# Altium footprint library LDO-DC_DC.PcbLib: 40 footprints (part 3 of 3)
Each footprint in its own frame and in the unit in brackets; x right, y up, seen from the top. Pads: shape width x height; smd on the part's side, far side on the other; paste and mask are expansions set on the pad; w line width, h text height; cw(c..) or ccw(c..) is an arc to the next point about the centre after c.
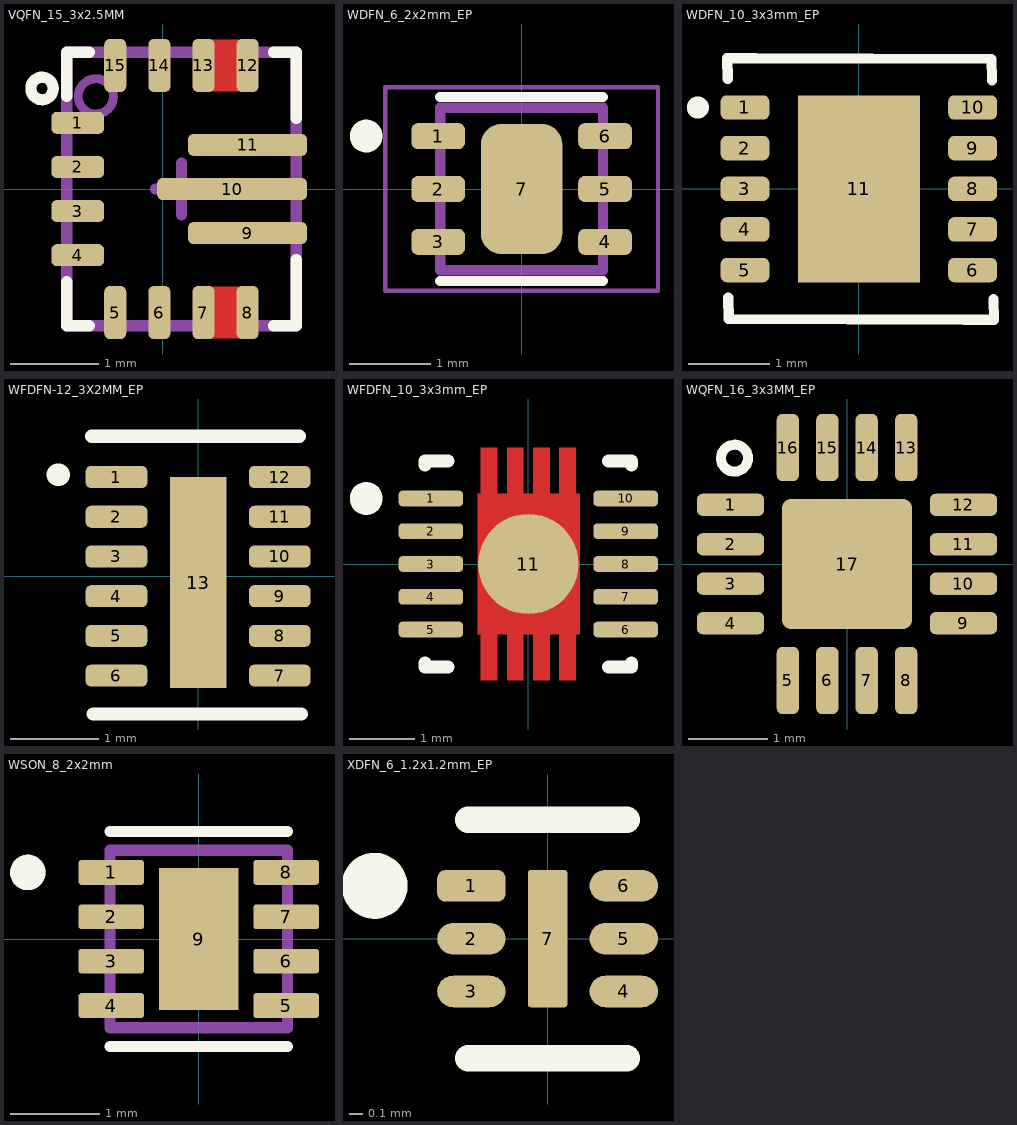
[diagram p2: the footprints below, top view; thin cyan lines are the x and y axes]

## VQFN_15_3x2.5MM [mm] "15-VQFN-HR / 20190221 / H-D.Garcia"
pads (15):
  rrect50% 0.6x0.25 smd: 1(-0.962,0.75) 2(-0.962,0.25) 3(-0.962,-0.25) 4(-0.962,-0.75)
  rrect50% 0.25x0.6 smd: 5(-0.537,-1.4) 6(-0.037,-1.4) 7(0.463,-1.4) 8(0.962,-1.4) 12(0.962,1.4) 13(0.463,1.4) 14(-0.037,1.4) 15(-0.537,1.4)
  rrect50% 1.35x0.25 smd: 9(0.963,-0.5) 11(0.963,0.5)
  rrect50% 1.7x0.25 smd: 10(0.788,0)
Top Layer:
  region: 0.378,1.689 1.028,1.689 1.028,1.109 0.378,1.109
  region: 0.378,-1.111 1.028,-1.111 1.028,-1.691 0.378,-1.691
Top Overlay:
  circle w0.127: c-1.367,1.139 r0.127
  lines w0.127: -1.087,-1.05 -1.087,-1.551 -0.832,-1.551 ; -1.087,1.05 -1.087,1.549 -0.832,1.549 ; 1.258,-1.551 1.513,-1.551 1.513,-0.8 ; 1.258,1.549 1.513,1.549 1.513,0.8
Mechanical 1:
  circle w0.1: c-0.757,1.049 r0.2
  lines w0.127: -1.087,-1.551 -1.087,1.549 1.513,1.549 1.513,-1.551 -1.087,-1.551
Mechanical 15:
  lines w0.127: -0.082,-0.001 0.508,-0.001 ; 0.213,-0.296 0.213,0.294 ; -1.087,-1.551 -1.087,1.549 1.513,1.549 1.513,-1.551 -1.087,-1.551
3D body "IC-TPS63070 VQFN-15.STEP": height 1.05, standoff 0, extent -1.087,-1.551 1.513,1.549

## WDFN_6_2x2mm_EP [mm] "/20210511/C-A.Serna.A"
pads (7):
  rrect50% 0.66x0.32 smd: 1(-1.025,0.65) 2(-1.025,0) 3(-1.025,-0.65) 4(1.025,-0.65) 5(1.025,0) 6(1.025,0.65)
  rrect50% 1x1.6 smd: 7(0,0)
Top Overlay:
  circle w0.203: c-1.91,0.65 r0.1
  lines w0.127: -1,-1.13 1,-1.13 ; -1,1.13 1,1.13
Mechanical 1:
  lines w0.127: -1,-1 1,-1 1,1 -1,1 -1,-1
Mechanical 15:
  lines w0.05: -1.675,-1.25 -1.675,1.25 1.675,1.25 1.675,-1.25 -1.675,-1.25
3D body "step_temp.STEP": height 0.8, standoff 0, extent -1.001,-1.003 0.999,0.997

## WDFN_10_3x3mm_EP [mm] "/ 20220809 / J-E.Pachon"
pads (11):
  rrect50% 0.6x0.3 smd: 1(-1.4,1) 2(-1.4,0.5) 3(-1.4,0) 4(-1.4,-0.5) 5(-1.4,-1) 6(1.4,-1) 7(1.4,-0.5) 8(1.4,0) 9(1.4,0.5) 10(1.4,1)
  rect 1.5x2.3 smd: 11(0,0)
Top Overlay:
  circle w0.25: c-1.98,1 r0.01
  lines w0.127: -1.611,1.35 -1.618,1.604 -1.272,1.604 1.633,1.596 1.638,1.336 ; -1.606,-1.341 -1.601,-1.601 1.304,-1.609 1.664,-1.609 1.657,-1.357
3D body "MLP10_3X3_ONS.step": height 0.81, standoff 0, extent -1.499,-1.499 1.499,1.499

## WFDFN-12_3X2MM_EP [mm] "20211216 / E.Naranjo"
pads (13):
  rrect50% 0.7x0.25 smd: 1(-0.925,1.125) 2(-0.925,0.675) 3(-0.925,0.225) 4(-0.925,-0.225) 5(-0.925,-0.675) 6(-0.925,-1.125) 7(0.925,-1.125) 8(0.925,-0.675) 9(0.925,-0.225) 10(0.925,0.225) 11(0.925,0.675) 12(0.925,1.125)
  rect 0.64x2.39 smd: 13(0,-0.07)
Top Overlay:
  lines w0.152: -1.207,1.586 1.147,1.586 ; -1.187,-1.56 1.167,-1.56
  lines w0.254: -1.59,1.15 ccw(c-1.59,1.495) -1.58,1.15
3D body "DFN-12_DDB_LIT.step": height 0.8, standoff 0, extent -1.041,-1.552 1.059,1.548

## WFDFN_10_3x3mm_EP [mm] "10-WFDFN,10-WSON / 20210511 / C-A.Serna.A"
pads (11):
  rrect50% 0.985x0.239 smd: 1(-1.487,1) 2(-1.487,0.5) 3(-1.487,0) 4(-1.487,-0.5) 5(-1.487,-1) 6(1.487,-1) 7(1.487,-0.5) 8(1.487,0) 9(1.487,0.5) 10(1.487,1)
  round 1.53 smd paste-1000 mask+0: 11(0,0)
Top Layer:
  region: -0.772,1.075 -0.725,1.075 -0.725,1.775 -0.475,1.775 -0.475,1.075 -0.325,1.075 -0.325,1.775 -0.075,1.775 -0.075,1.075 0.075,1.075 0.075,1.775 0.325,1.775 0.325,1.075 0.475,1.075 0.475,1.775 0.725,1.775 0.725,1.075 0.787,1.075 0.787,-1.075 0.725,-1.075 0.725,-1.775 0.475,-1.775 0.475,-1.075 0.325,-1.075 0.325,-1.775 0.075,-1.775 0.075,-1.075 -0.075,-1.075 -0.075,-1.775 -0.325,-1.775 -0.325,-1.075 -0.475,-1.075 -0.475,-1.775 -0.725,-1.775 -0.725,-1.075 -0.772,-1.075
Top Overlay:
  circle w0.25: c-2.475,1 r0.125
  lines w0.2: -1.575,-1.515 -1.575,-1.575 -1.225,-1.575 ; -1.575,1.515 -1.575,1.575 -1.225,1.575 ; 1.225,-1.575 1.575,-1.575 1.575,-1.515 ; 1.225,1.575 1.575,1.575 1.575,1.515
Top Paste:
  rectangle: -0.76,-1.01 -0.11,-0.11
  rectangle: -0.76,0.11 -0.11,1.01
  rectangle: 0.11,0.11 0.76,1.01
  rectangle: 0.485,-1.76 0.715,-1.16
  rectangle: 0.085,-1.76 0.315,-1.16
  rectangle: -0.315,-1.76 -0.085,-1.16
  rectangle: -0.715,-1.76 -0.485,-1.16
  rectangle: 0.485,1.16 0.715,1.76
  rectangle: 0.085,1.16 0.315,1.76
  rectangle: -0.315,1.16 -0.085,1.76
  rectangle: -0.715,1.16 -0.485,1.76
Mechanical 16:
  lines w0.1: -0.5,0 0.5,0 ; 0,-0.5 0,0.5
3D body "IC_Texas_Instruments_TPS63060DSCR_eec.STEP": height 0.8, standoff 0, extent -1.501,-1.501 1.502,1.502

## WQFN_16_3x3MM_EP [mm] "20190516 / V-A.Patino"
pads (17):
  rrect50% 0.85x0.28 smd: 1(-1.475,0.75) 2(-1.475,0.25) 3(-1.475,-0.25) 4(-1.475,-0.75) 9(1.475,-0.75) 10(1.475,-0.25) 11(1.475,0.25) 12(1.475,0.75)
  rrect50% 0.28x0.85 smd: 5(-0.75,-1.475) 6(-0.25,-1.475) 7(0.25,-1.475) 8(0.75,-1.475) 13(0.75,1.475) 14(0.25,1.475) 15(-0.25,1.475) 16(-0.75,1.475)
  rrect15% 1.65x1.65 smd: 17(0,0)
Top Overlay:
  circle w0.127: c-1.425,1.34 r0.171
3D body "User Library-S-PWQFN-N16.step": height 0.82, standoff 0.02, extent -1.505,-1.52 1.515,1.5

## WSON_8_2x2mm [mm] "/20210217/J-E.Pachon"
pads (9):
  rrect25% 0.74x0.28 smd: 1(-0.985,0.75) 2(-0.985,0.25) 3(-0.985,-0.25) 4(-0.985,-0.75) 5(0.985,-0.75) 6(0.985,-0.25) 7(0.985,0.25) 8(0.985,0.75)
  rect 0.9x1.6 smd paste-2: 9(0,0)
Top Overlay:
  circle w0.2: c-1.925,0.75 r0.1
  lines w0.127: -1,-1.21 1,-1.21 ; -1,1.21 1,1.21
Top Paste:
  region: 0.28,-0.51 -0.28,-0.51 -0.28,0.51 0.28,0.51
Mechanical 13:
  circle w0.2: c-1.925,0.75 r0.1
  lines w0.127: -1,-1 -1,1 1,1 1,-1 -1,-1
3D body "TPS62172QDSGRQ1.STEP": height 0.81, standoff 0.01, extent -1,-1 1,1

## XDFN_6_1.2x1.2mm_EP [mm] "/20210225/V-A.Patino"
pads (7):
  rrect50% 0.518x0.24 smd: 1(-0.577,0.4)
  rrect100% 0.518x0.24 smd: 2(-0.577,0) 3(-0.577,-0.4) 4(0.577,-0.4) 5(0.577,0) 6(0.577,0.4)
  rrect15% 0.3x1.04 smd: 7(0,0)
Top Overlay:
  circle w0.25: c-1.311,0.4 r0.125
  lines w0.2: -0.6,-0.905 0.6,-0.905 ; -0.6,0.9 0.6,0.9
Top Paste:
  rectangle: -0.071,-0.441 0.071,0.441
3D body "IC_ON_Semiconductor_NCP176AMX330TCG_eec.STEP": height 0.45, standoff 0, extent -0.61,-0.6 0.61,0.6